# Altium footprint library amirlib.PcbLib: 456 footprints (part 16 of 29)
Each footprint in its own frame and in the unit in brackets; x right, y up, seen from the top. Pads: shape width x height; smd on the part's side, far side on the other; paste and mask are expansions set on the pad; w line width, h text height; cw(c..) or ccw(c..) is an arc to the next point about the centre after c.
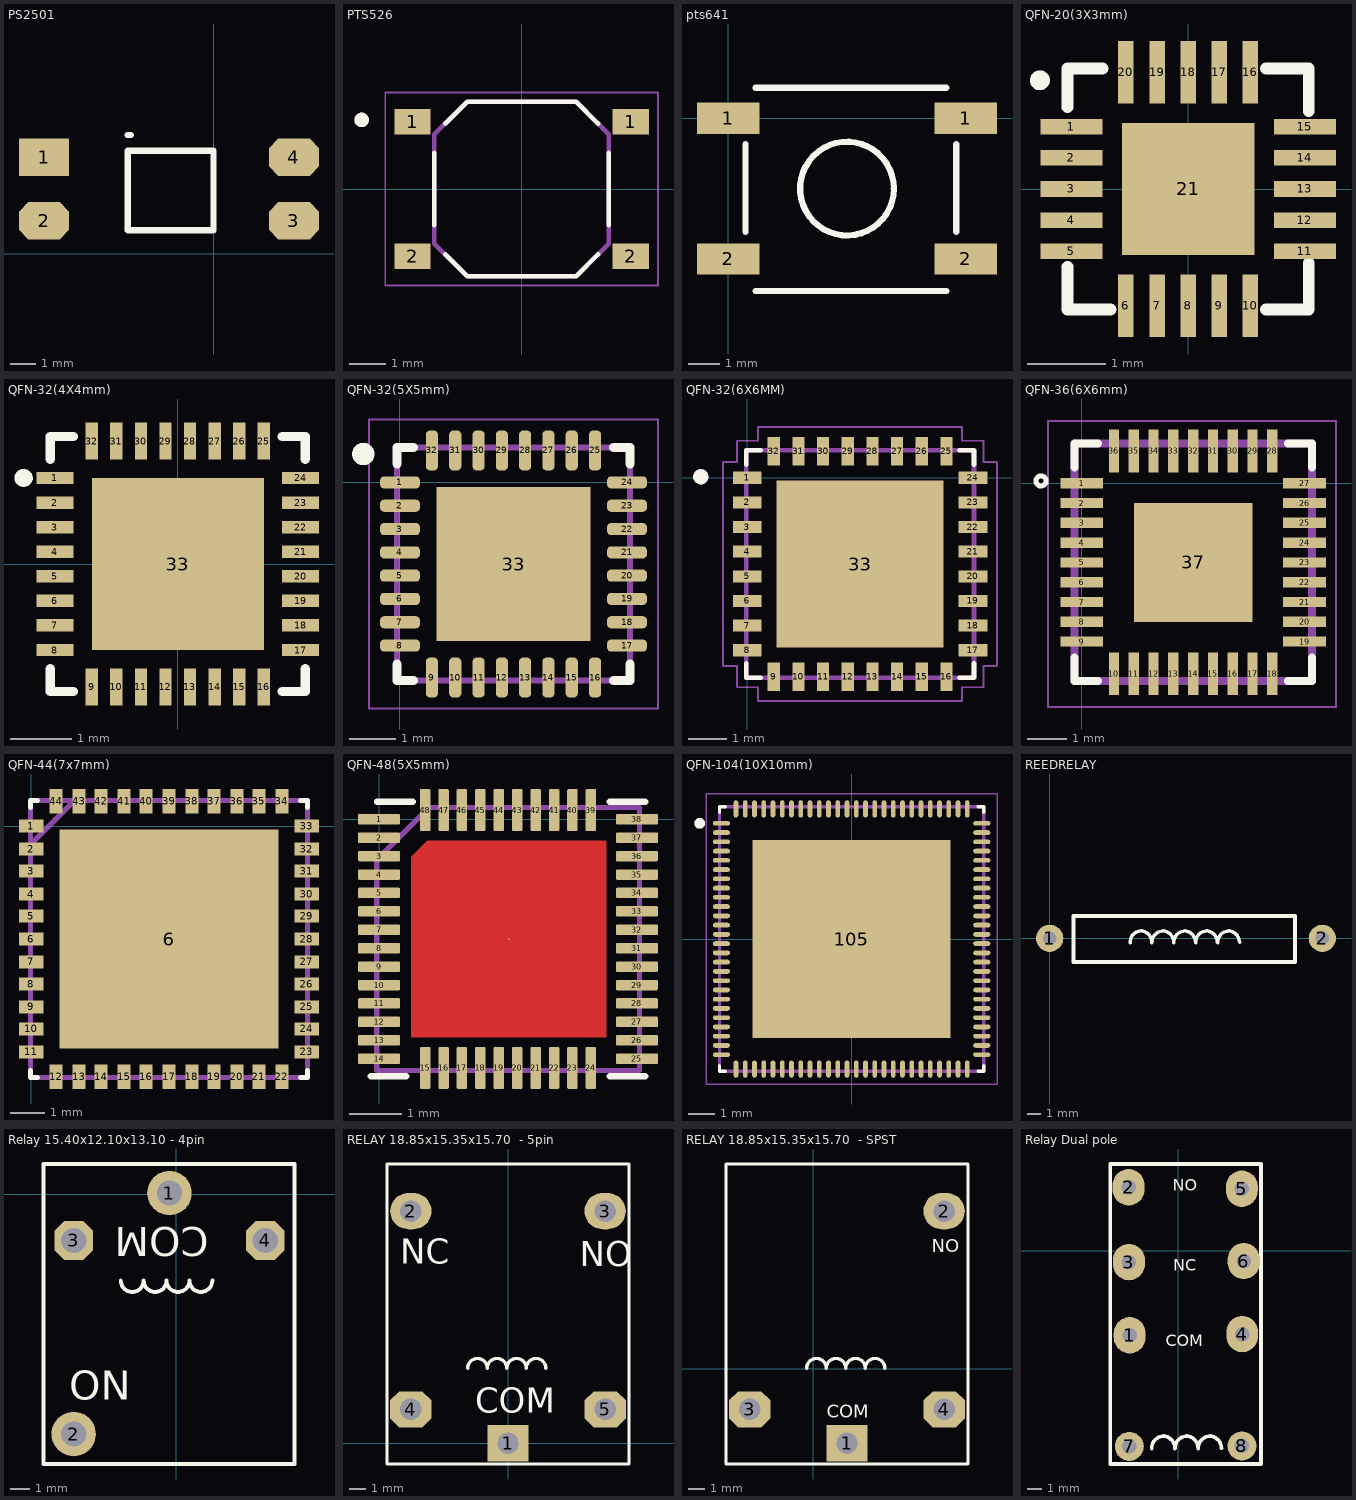
[diagram p15: the footprints below, top view; thin cyan lines are the x and y axes]

## PS2501 [mm]
pads (4):
  rect 2x1.5 smd: 1(-6.787,3.86)
  oct 2x1.5 smd: 2(-6.787,1.32) 3(3.213,1.32) 4(3.213,3.86)
Top Overlay:
  lines w0.254: -3.438,4.749 -3.311,4.749 ; -3.438,0.939 -0.009,0.939 -0.009,4.114 -3.438,4.114 -3.438,0.939
3D body "User Library-FOD817.STEP": height 4.6, standoff 0, extent -7.017,0.04 3.443,5.14

## PTS526 [mm]
pads (4):
  rect 1x0.7 smd: 1(-3,1.85) 1(3,1.85) 2(-3,-1.85) 2(3,-1.85)
Top Overlay:
  circle w0.2: c-4.4,1.9 r0.1
  lines w0.127: -2.4,-1 -2.4,1 ; -2.1,-1.8 -1.5,-2.4 1.5,-2.4 2.1,-1.8 ; -2.1,1.8 -1.5,2.4 1.5,2.4 2.1,1.8 ; 2.4,-1 2.4,1
Mechanical 13:
  circle w0.2: c-4.4,1.9 r0.1
  lines w0.127: -2.4,-1.5 -2.4,1.5 -1.5,2.4 1.5,2.4 2.4,1.5 2.4,-1.5 1.5,-2.4 -1.5,-2.4 -2.4,-1.5
Mechanical 15:
  lines w0.05: -3.75,-2.65 3.75,-2.65 3.75,2.65 -3.75,2.65 -3.75,-2.65
3D body "TL3342F260QG--3DModel-STEP-520916.STEP": height 1.46, standoff -0.04, extent -3.3,-2.5 3.3,2.5

## pts641 [mm]
pads (4):
  rect 2x1 smd: 1(0,0) 1(7.6,0) 2(0,-4.5) 2(7.6,-4.5)
Top Overlay:
  circle w0.2: c3.8,-2.25 r1.5
  lines w0.2: 0.549,-3.628 0.549,-0.828 ; 0.875,-5.526 6.975,-5.527 ; 0.875,0.976 6.975,0.976 ; 7.296,-3.628 7.296,-0.828
3D body "PTS641SK25.stp": height 2.5, standoff 0, extent -0.298,-5.575 8.102,1.025

## QFN-20(3X3mm) [mm]
pads (21):
  rect 0.8x0.2 smd paste-100 mask+0.051: 1(-1.5,0.8) 2(-1.5,0.4) 3(-1.5,0) 4(-1.5,-0.4) 5(-1.5,-0.8) 11(1.5,-0.8) 12(1.5,-0.4) 13(1.5,0) 14(1.5,0.4) 15(1.5,0.8)
  rect 0.2x0.8 smd paste-100 mask+0.051: 6(-0.8,-1.5) 7(-0.4,-1.5) 8(0,-1.5) 9(0.4,-1.5) 10(0.8,-1.5) 16(0.8,1.5) 17(0.4,1.5) 18(0,1.5) 19(-0.4,1.5) 20(-0.8,1.5)
  rect 1.7x1.7 smd paste-100 mask+0.051: 21(0,0)
Top Overlay:
  circle w0.152: c-1.905,1.397 r0.051
  lines w0.152: -1.55,-1 -1.55,-1.55 -1,-1.55 ; -1.55,1.05 -1.55,1.55 -1.1,1.55 ; 1,-1.55 1.55,-1.55 1.55,-0.95 ; 1,1.55 1.55,1.55 1.55,1
Top Paste:
  region: 1.9,-0.9 1.9,-0.7 1.1,-0.7 1.1,-0.9
  region: 1.9,-0.5 1.9,-0.3 1.1,-0.3 1.1,-0.5
  region: 1.9,-0.1 1.9,0.1 1.1,0.1 1.1,-0.1
  region: 1.9,0.3 1.9,0.5 1.1,0.5 1.1,0.3
  region: 1.9,0.7 1.9,0.9 1.1,0.9 1.1,0.7
  region: -1.1,-0.9 -1.1,-0.7 -1.9,-0.7 -1.9,-0.9
  region: -1.1,-0.5 -1.1,-0.3 -1.9,-0.3 -1.9,-0.5
  region: -1.1,-0.1 -1.1,0.1 -1.9,0.1 -1.9,-0.1
  region: -1.1,0.3 -1.1,0.5 -1.9,0.5 -1.9,0.3
  region: -1.1,0.7 -1.1,0.9 -1.9,0.9 -1.9,0.7
  region: -0.9,-1.9 -0.7,-1.9 -0.7,-1.1 -0.9,-1.1
  region: -0.5,-1.9 -0.3,-1.9 -0.3,-1.1 -0.5,-1.1
  region: -0.1,-1.9 0.1,-1.9 0.1,-1.1 -0.1,-1.1
  region: 0.3,-1.9 0.5,-1.9 0.5,-1.1 0.3,-1.1
  region: 0.7,-1.9 0.9,-1.9 0.9,-1.1 0.7,-1.1
  region: -0.9,1.1 -0.7,1.1 -0.7,1.9 -0.9,1.9
  region: -0.5,1.1 -0.3,1.1 -0.3,1.9 -0.5,1.9
  region: -0.1,1.1 0.1,1.1 0.1,1.9 -0.1,1.9
  region: 0.3,1.1 0.5,1.1 0.5,1.9 0.3,1.9
  region: 0.7,1.1 0.9,1.1 0.9,1.9 0.7,1.9
  region: 0.68,-0.68 -0.68,-0.68 -0.68,0.68 0.68,0.68
3D body "User Library-QFN40P300X300X60-20.STEP": height 0.6, standoff 0, extent -1.55,-1.55 1.55,1.55

## QFN-32(4X4mm) [mm]
pads (33):
  rect 0.599x0.201 smd paste-100 mask+0.051: 1(-2,1.401) 2(-2,0.999) 3(-2,0.601) 4(-2,0.199) 5(-2,-0.199) 6(-2,-0.601) 7(-2,-0.999) 8(-2,-1.401) 17(2,-1.401) 18(2,-0.999) 19(2,-0.601) 20(2,-0.199) 21(2,0.199) 22(2,0.601) 23(2,0.999) 24(2,1.401)
  rect 0.201x0.599 smd paste-100 mask+0.051: 9(-1.398,-2) 10(-0.999,-2) 11(-0.598,-2) 12(-0.199,-2) 13(0.199,-2) 14(0.601,-2) 15(0.999,-2) 16(1.401,-2) 25(1.401,2) 26(0.999,2) 27(0.601,2) 28(0.199,2) 29(-0.199,2) 30(-0.598,2) 31(-0.999,2) 32(-1.398,2)
  rect 2.799x2.799 smd paste-100 mask+0.051: 33(0.001,-0.001)
Top Overlay:
  lines w0.15: -2.584,1.391 -2.572,1.358 -2.544,1.335 -2.511,1.325 -2.475,1.335 -2.447,1.358 -2.435,1.391 -2.44,1.426 -2.46,1.457 -2.49,1.472 -2.529,1.472 -2.559,1.457 -2.579,1.426 -2.584,1.391
  lines w0.152: -2.076,-1.703 -2.076,-2.076 -1.703,-2.076 ; -2.076,1.703 -2.076,2.076 -1.703,2.076 ; 1.703,-2.076 2.076,-2.076 2.076,-1.703 ; 1.703,2.076 2.076,2.076 2.076,1.703
Top Paste:
  drawing of 33 lines, arcs and shapes, not listed
3D body "EFM8BB31F32G-A-QFN32.STEP": height 0.55, standoff 0, extent -1.999,-2.001 2.001,1.999

## QFN-32(5X5mm) [mm]
pads (33):
  rrect70% 0.86x0.26 smd: 1(0,0) 2(0,-0.5) 3(0,-1) 4(0,-1.5) 5(0,-2) 6(0,-2.5) 7(0,-3) 8(0,-3.5) 17(4.87,-3.5) 18(4.87,-3) 19(4.87,-2.5) 20(4.87,-2) 21(4.87,-1.5) 22(4.87,-1) 23(4.87,-0.5) 24(4.87,0)
  rrect70% 0.26x0.86 smd: 9(0.685,-4.185) 10(1.185,-4.185) 11(1.685,-4.185) 12(2.185,-4.185) 13(2.685,-4.185) 14(3.185,-4.185) 15(3.685,-4.185) 16(4.185,-4.185) 25(4.185,0.685) 26(3.685,0.685) 27(3.185,0.685) 28(2.685,0.685) 29(2.185,0.685) 30(1.685,0.685) 31(1.185,0.685) 32(0.685,0.685)
  rect 3.3x3.3 smd paste-3: 33(2.435,-1.75)
Top Overlay:
  circle w0.254: c-0.787,0.61 r0.114
  lines w0.2: -0.065,-3.9 -0.065,-4.25 0.285,-4.25 ; -0.065,0.4 -0.065,0.75 0.285,0.75 ; 4.585,-4.25 4.935,-4.25 4.935,-3.9 ; 4.585,0.75 4.935,0.75 4.935,0.4
Mechanical 13:
  lines w0.127: -0.065,-4.25 4.935,-4.25 4.935,0.75 -0.065,0.75 -0.065,-4.25
Mechanical 15:
  lines w0.05: -0.665,-4.85 5.535,-4.85 5.535,1.35 -0.665,1.35 -0.665,-4.85
3D body "User Library-QFN-32-5x5 - EQ.STEP": height 0.85, standoff 0, extent -0.065,-4.25 4.935,0.75

## QFN-32(6X6MM) [mm]
pads (33):
  rect 0.76x0.32 smd: 1(0,0) 2(0,-0.65) 3(0,-1.3) 4(0,-1.95) 5(0,-2.6) 6(0,-3.25) 7(0,-3.9) 8(0,-4.55) 17(5.95,-4.55) 18(5.95,-3.9) 19(5.95,-3.25) 20(5.95,-2.6) 21(5.95,-1.95) 22(5.95,-1.3) 23(5.95,-0.65) 24(5.95,0)
  rect 0.32x0.76 smd: 9(0.7,-5.25) 10(1.35,-5.25) 11(2,-5.25) 12(2.65,-5.25) 13(3.3,-5.25) 14(3.95,-5.25) 15(4.6,-5.25) 16(5.25,-5.25) 25(5.25,0.7) 26(4.6,0.7) 27(3.95,0.7) 28(3.3,0.7) 29(2.65,0.7) 30(2,0.7) 31(1.35,0.7) 32(0.7,0.7)
  rect 4.4x4.4 smd paste-0.809: 33(2.975,-2.275)
Top Overlay:
  circle w0.2: c-1.225,0.025 r0.1
  lines w0.127: -0.025,-4.895 -0.025,-5.275 0.355,-5.275 ; -0.025,0.345 -0.025,0.725 0.355,0.725 ; 5.595,-5.275 5.975,-5.275 5.975,-4.895 ; 5.595,0.725 5.975,0.725 5.975,0.345
Mechanical 13:
  circle w0.2: c-1.225,0.025 r0.1
  lines w0.127: -0.025,-5.275 5.975,-5.275 5.975,0.725 -0.025,0.725 -0.025,-5.275
Mechanical 15:
  lines w0.05: -0.635,-4.965 -0.635,0.415 -0.275,0.415 -0.275,0.975 0.285,0.975 0.285,1.335 5.665,1.335 5.665,0.975 6.225,0.975 6.225,0.415 6.585,0.415 6.585,-4.965 6.225,-4.965 6.225,-5.525 5.665,-5.525 5.665,-5.885 0.285,-5.885 0.285,-5.525 -0.275,-5.525 -0.275,-4.965 -0.635,-4.965
3D body "step_temp.STEP": height 0.9, standoff 0, extent -0.025,-5.275 5.975,0.725

## QFN-36(6X6mm) [mm]
pads (37):
  rect 1.08x0.26 smd: 1(0,0) 2(0,-0.5) 3(0,-1) 4(0,-1.5) 5(0,-2) 6(0,-2.5) 7(0,-3) 8(0,-3.5) 9(0,-4) 19(5.63,-4) 20(5.63,-3.5) 21(5.63,-3) 22(5.63,-2.5) 23(5.63,-2) 24(5.63,-1.5) 25(5.63,-1) 26(5.63,-0.5) 27(5.63,0)
  rect 0.26x1.08 smd: 10(0.815,-4.815) 11(1.315,-4.815) 12(1.815,-4.815) 13(2.315,-4.815) 14(2.815,-4.815) 15(3.315,-4.815) 16(3.815,-4.815) 17(4.315,-4.815) 18(4.815,-4.815) 28(4.815,0.815) 29(4.315,0.815) 30(3.815,0.815) 31(3.315,0.815) 32(2.815,0.815) 33(2.315,0.815) 34(1.815,0.815) 35(1.315,0.815) 36(0.815,0.815)
  rect 3x3 smd paste-0.679: 37(2.815,-2)
Top Overlay:
  circle w0.127: c-1.028,0.058 r0.127
  lines w0.2: -0.185,-4.4 -0.185,-5 0.415,-5 ; -0.185,0.4 -0.185,1 0.415,1 ; 5.215,-5 5.815,-5 5.815,-4.4 ; 5.215,1 5.815,1 5.815,0.4
Mechanical 13:
  lines w0.127: -0.185,-5 -0.185,1
  lines w0.2: -0.185,-5 -0.185,1 5.815,1 5.815,-5 -0.185,-5
Mechanical 15:
  lines w0.05: -0.85,-5.655 -0.85,1.575 6.423,1.575 6.423,-5.655 -0.85,-5.655
3D body "step_temp.STEP": height 1, standoff 0, extent -0.185,-5 5.815,1

## QFN-44(7x7mm) [mil]
pads (45):
  rect 28x15 smd: 1(0,0) 2(0,-26) 3(0,-51) 4(0,-77) 5(0,-102) 6(0,-128) 7(0,-154) 8(0,-179) 9(0,-205) 10(0,-230) 11(0,-256) 23(312,-256) 24(312,-230) 25(312,-205) 26(312,-179) 27(312,-154) 28(312,-128) 29(312,-102) 30(312,-77) 31(312,-51) 32(312,-26) 33(312,0)
  rect 248x248 smd: 6(156,-128)
  rect 15x28 smd: 12(28,-284) 13(54,-284) 14(79,-284) 15(105,-284) 16(130,-284) 17(156,-284) 18(182,-284) 19(207,-284) 20(233,-284) 21(258,-284) 22(284,-284) 34(284,28) 35(258,28) 36(233,28) 37(207,28) 38(182,28) 39(156,28) 40(130,28) 41(105,28) 42(79,28) 43(54,28) 44(28,28)
Top Overlay:
  lines w6: -1,-277 -1,-285 7,-285 ; -1,21 -1,29 7,29 ; 305,-285 313,-285 313,-277 ; 305,29 313,29 313,21
Mechanical 13:
  lines w6: -1,-285 313,-285 ; -1,-285 -1,29 ; -1,-285 313,-285 ; -1,-285 -1,29 ; -1,29 313,29 ; -1,29 313,29 ; 313,-285 313,29 ; 313,-285 313,29 ; -1,-263 -1,-248 -1,-263 ; -1,-238 -1,-223 -1,-238 ; -1,-212 -1,-197 -1,-212 ; -1,-187 -1,-172 -1,-187 ; -1,-161 -1,-146 -1,-161 ; -1,-135 -1,-121 -1,-135 ; -1,-110 -1,-95 -1,-110 ; -1,-84 -1,-69 -1,-84 ; -1,-59 -1,-44 -1,-59 ; -1,-33 -1,-18 -1,-33 ; -1,-21 49,29 -1,-21 ; -1,-8 -1,7 -1,-8 ; 21,-285 36,-285 21,-285 ; 21,29 36,29 21,29 ; 46,-285 61,-285 46,-285 ; 46,29 61,29 46,29 ; 72,-285 87,-285 72,-285 ; 72,29 87,29 72,29 ; 97,-285 112,-285 97,-285 ; 97,29 112,29 97,29 ; 123,-285 138,-285 123,-285 ; 123,29 138,29 123,29 ; 149,-285 163,-285 149,-285 ; 149,29 163,29 149,29 ; 174,-285 189,-285 174,-285 ; 174,29 189,29 174,29 ; 200,-285 215,-285 200,-285 ; 200,29 215,29 200,29 ; 225,-285 240,-285 225,-285 ; 225,29 240,29 225,29 ; 251,-285 266,-285 251,-285 ; 251,29 266,29 251,29 ; 276,-285 291,-285 276,-285 ; 276,29 291,29 276,29 ; 313,-263 313,-248 313,-263 ; 313,-238 313,-223 313,-238 ; 313,-212 313,-197 313,-212 ; 313,-187 313,-172 313,-187 ; 313,-161 313,-146 313,-161 ; 313,-135 313,-121 313,-135 ; 313,-110 313,-95 313,-110 ; 313,-84 313,-69 313,-84 ; 313,-59 313,-44 313,-59 ; 313,-33 313,-18 313,-33 ; 313,-8 313,7 313,-8
3D body "ENC424J600-I_ML--3DModel-STEP-510211.STEP": height 39.37, standoff 0, extent -1.48,-285.48 313.48,29.48

## QFN-48(5X5mm) [mm]
pads (49):
  rrect25% 0.8x0.2 smd mask+0.05: 1(0,0) 2(0,-0.35) 3(0,-0.7) 4(0,-1.05) 5(0,-1.4) 6(0,-1.75) 7(0,-2.1) 8(0,-2.45) 9(0,-2.8) 10(0,-3.15) 11(0,-3.5) 12(0,-3.85) 13(0,-4.2) 14(0,-4.55) 25(4.9,-4.55) 26(4.9,-4.2) 27(4.9,-3.85) 28(4.9,-3.5) 29(4.9,-3.15) 30(4.9,-2.8) 31(4.9,-2.45) 32(4.9,-2.1) 33(4.9,-1.75) 34(4.9,-1.4) 35(4.9,-1.05) 36(4.9,-0.7) 37(4.9,-0.35) 38(4.9,0)
  rrect25% 0.2x0.8 smd mask+0.05: 15(0.875,-4.725) 16(1.225,-4.725) 17(1.575,-4.725) 18(1.925,-4.725) 19(2.275,-4.725) 20(2.625,-4.725) 21(2.975,-4.725) 22(3.325,-4.725) 23(3.675,-4.725) 24(4.025,-4.725) 39(4.025,0.175) 40(3.675,0.175) 41(3.325,0.175) 42(2.975,0.175) 43(2.625,0.175) 44(2.275,0.175) 45(1.925,0.175) 46(1.575,0.175) 47(1.225,0.175) 48(0.875,0.175)
  round 0.025 smd: 49(2.466,-2.277)
Top Layer:
  region: 0.612,-4.144 4.32,-4.144 4.32,-0.41 0.917,-0.41 0.612,-0.715
Top Overlay:
  lines w0.12: -0.16,-4.885 0.515,-4.885 ; -0.038,0.335 0.637,0.335 ; 4.385,-4.885 5.06,-4.885 ; 4.385,0.335 5.06,0.335
Mechanical 13:
  lines w0.1: -0.05,-4.775 -0.05,-0.775 0.95,0.225 4.95,0.225 4.95,-4.775 -0.05,-4.775
3D body "ESP32-U4WDH--3DModel-STEP-269445.STEP": height 0.9, standoff 0, extent -0.045,-4.775 4.955,0.225

## QFN-104(10X10mm) [mm]
pads (105):
  oval 0.65x0.18 smd paste+0 mask+0: 1(-4.925,4.375) 2(-4.925,4.025) 3(-4.925,3.675) 4(-4.925,3.325) 5(-4.925,2.975) 6(-4.925,2.625) 7(-4.925,2.275) 8(-4.925,1.925) 9(-4.925,1.575) 10(-4.925,1.225) 11(-4.925,0.875) 12(-4.925,0.525) 13(-4.925,0.175) 14(-4.925,-0.175) 15(-4.925,-0.525) 16(-4.925,-0.875) 17(-4.925,-1.225) 18(-4.925,-1.575) 19(-4.925,-1.925) 20(-4.925,-2.275) 21(-4.925,-2.625) 22(-4.925,-2.975) 23(-4.925,-3.325) 24(-4.925,-3.675) 25(-4.925,-4.025) 26(-4.925,-4.375) 53(4.925,-4.375) 54(4.925,-4.025) 55(4.925,-3.675) 56(4.925,-3.325) 57(4.925,-2.975) 58(4.925,-2.625) 59(4.925,-2.275) 60(4.925,-1.925) 61(4.925,-1.575) 62(4.925,-1.225) 63(4.925,-0.875) 64(4.925,-0.525) 65(4.925,-0.175) 66(4.925,0.175) 67(4.925,0.525) 68(4.925,0.875) 69(4.925,1.225) 70(4.925,1.575) 71(4.925,1.925) 72(4.925,2.275) 73(4.925,2.625) 74(4.925,2.975) 75(4.925,3.325) 76(4.925,3.675) 77(4.925,4.025) 78(4.925,4.375)
  oval 0.18x0.65 smd paste+0 mask+0: 27(-4.375,-4.925) 28(-4.025,-4.925) 29(-3.675,-4.925) 30(-3.325,-4.925) 31(-2.975,-4.925) 32(-2.625,-4.925) 33(-2.275,-4.925) 34(-1.925,-4.925) 35(-1.575,-4.925) 36(-1.225,-4.925) 37(-0.875,-4.925) 38(-0.525,-4.925) 39(-0.175,-4.925) 40(0.175,-4.925) 41(0.525,-4.925) 42(0.875,-4.925) 43(1.225,-4.925) 44(1.575,-4.925) 45(1.925,-4.925) 46(2.275,-4.925) 47(2.625,-4.925) 48(2.975,-4.925) 49(3.325,-4.925) 50(3.675,-4.925) 51(4.025,-4.925) 52(4.375,-4.925) 79(4.375,4.925) 80(4.025,4.925) 81(3.675,4.925) 82(3.325,4.925) 83(2.975,4.925) 84(2.625,4.925) 85(2.275,4.925) 86(1.925,4.925) 87(1.575,4.925) 88(1.225,4.925) 89(0.875,4.925) 90(0.525,4.925) 91(0.175,4.925) 92(-0.175,4.925) 93(-0.525,4.925) 94(-0.875,4.925) 95(-1.225,4.925) 96(-1.575,4.925) 97(-1.925,4.925) 98(-2.275,4.925) 99(-2.625,4.925) 100(-2.975,4.925) 101(-3.325,4.925) 102(-3.675,4.925) 103(-4.025,4.925) 104(-4.375,4.925)
  rect 7.5x7.5 smd paste-2.96 mask+0.102: 105(0,0)
Top Overlay:
  circle w0.2: c-5.75,4.375 r0.1
  lines w0.127: -5,-4.785 -5,-5 -4.785,-5 ; -5,4.785 -5,5 -4.785,5 ; 4.785,-5 5,-5 5,-4.785 ; 4.785,5 5,5 5,4.785
Top Paste:
  region: 3.29,-0.79 1.71,-0.79 1.71,0.79 3.29,0.79
  region: -1.71,-0.79 -3.29,-0.79 -3.29,0.79 -1.71,0.79
  region: 0.79,1.75 -0.79,1.75 -0.79,3.33 0.79,3.33
  region: 3.29,1.71 1.71,1.71 1.71,3.29 3.29,3.29
  region: -1.71,1.71 -3.29,1.71 -3.29,3.29 -1.71,3.29
  region: 0.79,-3.29 -0.79,-3.29 -0.79,-1.71 0.79,-1.71
  region: 3.29,-3.29 1.71,-3.29 1.71,-1.71 3.29,-1.71
  region: -1.71,-3.29 -3.29,-3.29 -3.29,-1.71 -1.71,-1.71
Top Solder:
  drawing of 104 lines, arcs and shapes, not listed
Mechanical 13:
  circle w0.2: c-5.75,4.375 r0.1
  lines w0.127: -5,-5 -5,5 5,5 5,-5 -5,-5
Mechanical 15:
  lines w0.05: -5.5,-5.5 -5.5,5.5 5.5,5.5 5.5,-5.5 -5.5,-5.5
3D body "ESP32-P4_QFN104_10x10_Altium.step": height 0.87, standoff 0, extent -5,-4.996 5,5.004

## REEDRELAY [mm]
pads (2):
  round 2 hole 1: 1(0,0) 2(20,0)
Top Overlay:
  lines w0.254: 5.897,-0.332 cw(c6.747,-0.304) 6.747,0.546 ; 6.722,0.543 cw(c6.647,-0.307) 7.5,-0.307 ; 7.501,-0.332 cw(c8.351,-0.307) 8.351,0.543 ; 8.326,0.543 cw(c8.251,-0.307) 9.105,-0.307 ; 9.101,-0.332 cw(c9.951,-0.307) 9.951,0.543 ; 9.926,0.543 cw(c9.851,-0.307) 10.705,-0.307 ; 10.701,-0.332 cw(c11.551,-0.307) 11.551,0.543 ; 11.526,0.543 cw(c11.451,-0.307) 12.305,-0.307 ; 12.322,-0.332 cw(c13.172,-0.307) 13.172,0.543 ; 13.147,0.543 cw(c13.072,-0.307) 13.925,-0.307
  lines w0.3: 1.75,1.625 1.75,1.625 ; 1.75,1.625 1.75,1.4 1.75,-1.725 18,-1.725 18,1.625 1.75,1.625

## Relay 15.40x12.10x13.10 - 4pin [mm]
pads (4):
  round 2.3 hole 1.3: 1(-0.35,0.075) 2(-5.3,-12.375)
  oct 2x2 hole 1.3: 3(-5.3,-2.375) 4(4.6,-2.375)
Top Overlay:
  lines w0.2: -2.865,-4.44 ccw(c-2.274,-4.44) -1.683,-4.44 ccw(c-1.092,-4.44) -0.501,-4.44 ccw(c0.09,-4.44) 0.681,-4.44 ccw(c1.272,-4.44) 1.863,-4.44 ; -6.85,-13.925 6.1,-13.925 6.1,1.575 -6.85,1.575 -6.85,-13.925
  text "COM" at 1.682,-1.703 h1.5
  text "NO" at -2.357,-9.094 h1.5
3D body "relay.STEP": height 15.6, standoff -2, extent -6.5,-13.95 5.6,1.35

## RELAY 18.85x15.35x15.70  - 5pin [mm]
pads (5):
  rect 2.5x2.2 hole 1.3: 1(0,0)
  oval 2.5x2.2 hole 1.3: 2(-5.875,14.05) 3(5.875,14.05)
  oct 2.5x2.2 hole 1.3: 4(-5.875,2.05) 5(5.875,2.05)
Top Overlay:
  lines w0.2: -2.438,4.545 cw(c-1.847,4.545) -1.256,4.545 cw(c-0.665,4.545) -0.074,4.545 cw(c0.517,4.545) 1.108,4.545 cw(c1.699,4.545) 2.29,4.545 ; -7.325,-1.25 7.325,-1.25 7.325,16.9 -7.325,16.9 -7.325,-1.25
  text "NC" at -6.525,10.85 h1.5
  text "NO" at 4.35,10.725 h1.5
  text "COM" at -1.981,1.843 h1.5
3D body "relay2.STEP": height 15.7, standoff -1.8, extent -7.366,-1.69 7.634,17.01

## RELAY 18.85x15.35x15.70  - SPST [mm]
pads (4):
  rect 2.5x2.2 hole 1.3: 1(2.048,-4.517)
  oval 2.5x2.2 hole 1.3: 2(7.923,9.533)
  oct 2.5x2.2 hole 1.3: 3(-3.827,-2.467) 4(7.923,-2.467)
Top Overlay:
  lines w0.2: -0.39,0.029 cw(c0.201,0.029) 0.792,0.029 cw(c1.383,0.029) 1.974,0.029 cw(c2.565,0.029) 3.156,0.029 cw(c3.747,0.029) 4.338,0.029 ; -5.277,-5.767 -5.277,12.383 9.373,12.383 9.373,-5.767 -5.277,-5.767
  text "COM" at 0.829,-2.983 h0.8
  text "NO" at 7.179,7.05 h0.8
3D body "User Library-HF3FF005-1HST.STEP": height 15.52, standoff -2.98, extent -5.544,-6.013 9.656,12.987

## Relay Dual pole [mm]
pads (8):
  oval 2.2x2.5 hole 1: 1(-3.353,-5.817) 2(-3.429,4.369) 3(-3.404,-0.787) 4(4.394,-5.74) 5(4.369,4.267) 6(4.496,-0.711)
  round 2 hole 1: 7(-3.378,-13.462) 8(4.369,-13.437)
Top Overlay:
  lines w0.254: -1.841,-13.626 cw(c-0.991,-13.601) -0.991,-12.75 ; -1.016,-12.751 cw(c-1.091,-13.601) -0.237,-13.601 ; -0.241,-13.626 cw(c0.609,-13.601) 0.609,-12.75 ; 0.584,-12.751 cw(c0.509,-13.601) 1.363,-13.601 ; 1.359,-13.626 cw(c2.209,-13.601) 2.209,-12.75 ; 2.184,-12.751 cw(c2.109,-13.601) 2.963,-13.601 ; -4.699,-14.676 5.69,-14.676 5.69,5.969 -4.699,5.969 -4.699,-14.676
  text "NO" at -0.381,4.14 h0.8
  text "NC" at -0.356,-1.372 h0.8
  text "COM" at -0.864,-6.579 h0.8
3D body "g5v-2_3dc.stp": height 11.5, standoff -3.5, extent -4.542,-14.72 5.558,5.78